# Altium integrated library 796739-2.IntLib: 1 symbol
Pins are listed as number, name and electrical type; pins without a type are passive.

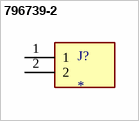
[diagram p0: symbol 796739-2]

## 796739-2
designator J?
2 Position Wire to Board Terminal Block Horizontal with Board 0.375 (9.53mm) Through Hole; Number_of_Positions: 2; MF: TE Connectivity; MP: 796739-2; Centerline_Pitch: 9.53 mm[.375 in]; SnapEDA_Link: https://www.snapeda.com/parts/796739-2/TE+Connectivity+AMP+Connectors/view-part/?ref=snap; Package: None; Value: *; EU_RoHS_Compliance: Compliant with Exemptions; Check_prices: https://www.snapeda.com/parts/796739-2/TE+Connectivity+AMP+Connectors/view-part/?ref=eda
footprint TE_796739-2
pins: 1, 2